# Altium footprint library STM32BlackPill.PcbLib: 1 footprints
Each footprint in its own frame and in the unit in brackets; x right, y up, seen from the top. Pads: shape width x height; smd on the part's side, far side on the other; paste and mask are expansions set on the pad; w line width, h text height; cw(c..) or ccw(c..) is an arc to the next point about the centre after c.
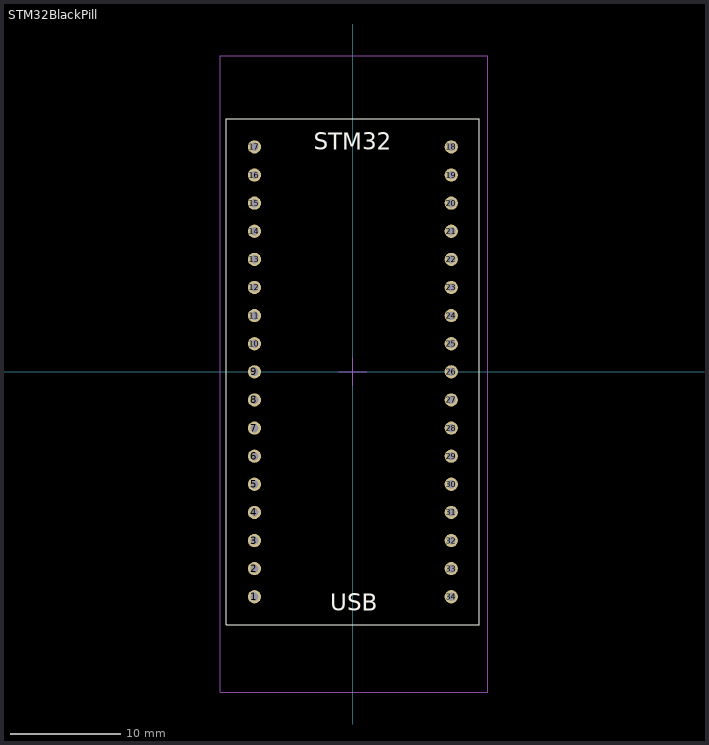
[diagram p0: the footprint, top view; thin cyan lines are the x and y axes]

## STM32BlackPill [mil] "Footprint of STM32BlackPill"
pads (34):
  oval 47.01x47 hole 30: 1(-350,-800) 2(-350,-700) 3(-350,-600) 4(-350,-500) 5(-350,-400) 6(-350,-300) 7(-350,-200) 8(-350,-100) 9(-350,0) 10(-350,100) 11(-350,200) 12(-350,300) 13(-350,400) 14(-350,500) 15(-350,600) 16(-350,700) 17(-350,800)
  round 47 hole 30: 18(350,800) 19(350,700) 20(350,600) 21(350,500) 22(350,400) 23(350,300) 24(350,200) 25(350,100) 26(350,0) 27(350,-100) 28(350,-200) 29(350,-300) 30(350,-400) 31(350,-500) 32(350,-600) 33(350,-700) 34(350,-800)
Top Overlay:
  lines w3.94: -450,-900 450,-900 450,900 -350,900 -450,900 -450,-900
  text "USB" at -80,-850 h60
  text "STM32" at -140,790 h60
Mechanical 13:
  lines w3.94: -472,1124 -472,-1139.5 480,-1139.5 480,1123.5 -471.5,1123.5
Mechanical 15:
  lines w3.94: -50,0 50,0 ; 0,-50 0,50 0,0
3D body "STM32BlackPill.step": height 537.01, standoff 44.88, extent -472.76,-1140 480,1123.78